# Altium footprint library WR-MJ.PcbLib: 84 footprints (part 5 of 6)
Each footprint in its own frame and in the unit in brackets; x right, y up, seen from the top. Pads: shape width x height; smd on the part's side, far side on the other; paste and mask are expansions set on the pad; w line width, h text height; cw(c..) or ccw(c..) is an arc to the next point about the centre after c.
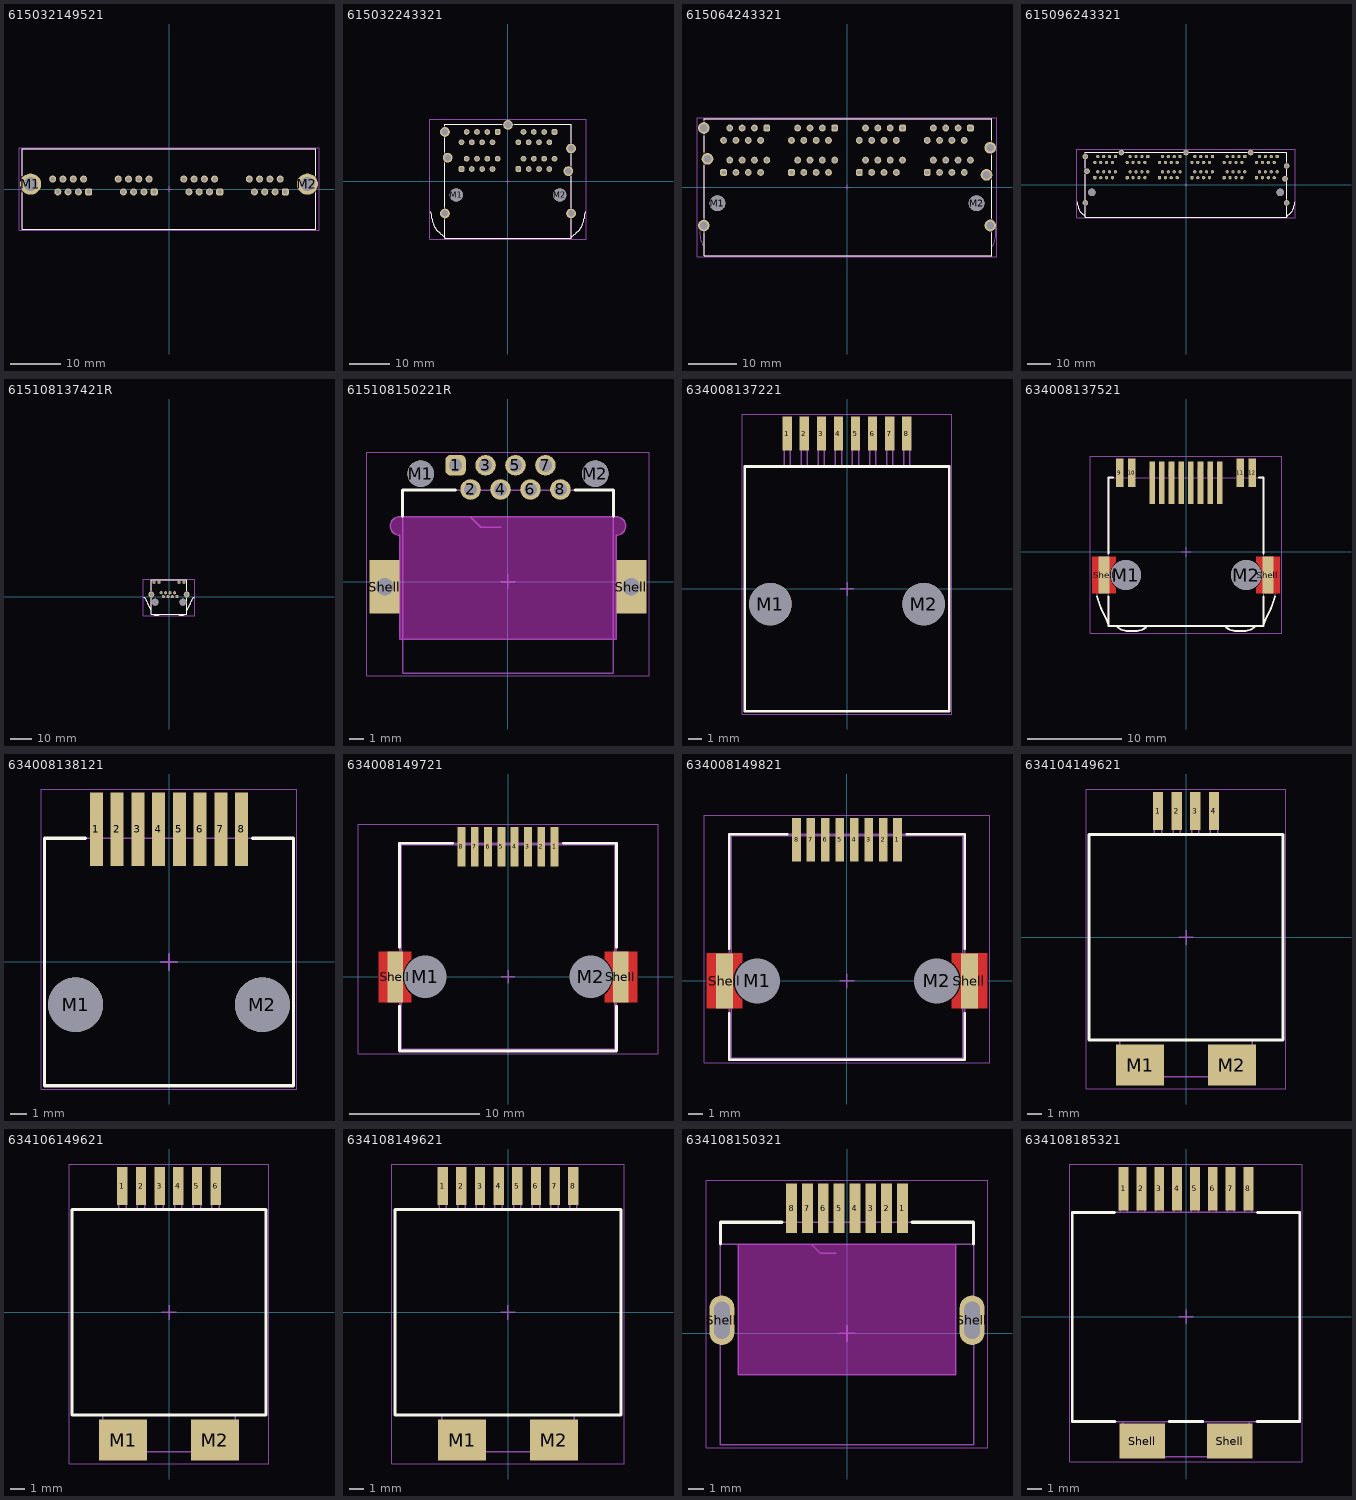
[diagram p4: the footprints below, top view; thin cyan lines are the x and y axes]

## 615032149521 [mm] "Modular Jack Horizontal Plastic 8P8C Assembly Tab Up"
height 15.4
pads (34):
  rrect50% 1.4x1.4 hole 0.9: A1(-15.93,-0.57) B1(-2.93,-0.57) C1(10.07,-0.57) D1(23.07,-0.57)
  round 1.4 hole 0.9: A2(-16.95,1.97) A3(-17.97,-0.57) A4(-18.99,1.97) A5(-20.01,-0.57) A6(-21.03,1.97) A7(-22.05,-0.57) A8(-23.07,1.97) B2(-3.95,1.97) B3(-4.97,-0.57) B4(-5.99,1.97) B5(-7.01,-0.57) B6(-8.03,1.97) B7(-9.05,-0.57) B8(-10.07,1.97) C2(9.05,1.97) C3(8.03,-0.57) C4(7.01,1.97) C5(5.99,-0.57) C6(4.97,1.97) C7(3.95,-0.57) C8(2.93,1.97) D2(22.05,1.97) D3(21.03,-0.57) D4(20.01,1.97) D5(18.99,-0.57) D6(17.97,1.97) D7(16.95,-0.57) D8(15.93,1.97)
  round 4.2 hole 2.8: M1(-27.45,0.97) M2(27.45,0.97)
Top Overlay:
  lines w0.2: -29.14,-0.75 -29.14,-8 29.14,-8 29.14,-0.75 ; -29.14,2.65 -29.14,8 29.14,8 29.14,2.65
Top Assembly:
  lines w0.1: -29.14,-8 -29.14,8 29.14,8 29.14,-8 -29.14,-8
Top Designator:
  text ".Designator" at -3.647,-0.357 h1
Top Courtyard:
  lines w0.05: -29.75,-8.2 29.75,-8.2 29.75,8.2 -29.75,8.2 -29.75,-8.2
Top Component Center:
  lines w0.1: -0.5,0 0.5,0 ; 0,-0.5 0,0.5
3D body "615032149521.stp": height 15.53, standoff -4.01, extent -29.14,-8 29.14,8

## 615032243321 [mm] "Modular Jack Horizontal Shielded 2x Dual Stacked with EMI Panel Finger 8P8C Tab Up&Down"
height 25.29
pads (41):
  rrect50% 1.4x1.4 hole 0.89: A1(-2.54,12.17) B1(11.43,12.17) C1(-11.43,3.05) D1(2.54,3.05)
  round 1.4 hole 0.89: A2(-3.81,9.63) A3(-5.08,12.17) A4(-6.35,9.63) A5(-7.62,12.17) A6(-8.89,9.63) A7(-10.16,12.17) A8(-11.43,9.63) B2(10.16,9.63) B3(8.89,12.17) B4(7.62,9.63) B5(6.35,12.17) B6(5.08,9.63) B7(3.81,12.17) B8(2.54,9.63) C2(-10.16,5.59) C3(-8.89,3.05) C4(-7.62,5.59) C5(-6.35,3.05) C6(-5.08,5.59) C7(-3.81,3.05) C8(-2.54,5.59) D2(3.81,5.59) D3(5.08,3.05) D4(6.35,5.59) D5(7.62,3.05) D6(8.89,5.59) D7(10.16,3.05) D8(11.43,5.59)
  round 3.25 hole 3.25 unplated: M1(-12.7,-3.3) M2(12.7,-3.3)
  round 2.4 hole 1.6: Shell(-15.495,-7.87) Shell(-15.495,12.17) Shell(-14.82,5.84) Shell(0,13.9) Shell(14.82,2.54) Shell(15.495,-7.87) Shell(15.495,8.1)
Top Overlay:
  lines w0.2: -18.991,-7.388 cw(c-27.747,-9.899) -18.677,-9.062 ccw(c-14.174,-8.889) -17.251,-12.18 ccw(c-13.756,-9.252) -16.336,-13.012 ccw(c-9.917,-7.318) -15.585,-13.76 ; -15.585,-9.35 -15.585,-14 15.585,-14 15.585,-9.34 ; -15.585,-6.39 -15.585,4.55 ; -15.585,7.13 -15.585,10.7 ; -15.585,13.64 -15.585,14 -1.485,14 ; 1.485,14 15.585,14 15.585,9.55 ; 15.585,-13.76 ccw(c9.917,-7.318) 16.336,-13.012 ccw(c13.756,-9.252) 17.252,-12.18 ccw(c14.175,-8.889) 18.677,-9.062 cw(c27.747,-9.899) 18.991,-7.388 ; 15.585,-6.4 15.585,1.28 ; 15.585,3.8 15.585,6.65
Top Assembly:
  lines w0.1: -18.991,-7.388 cw(c-27.747,-9.899) -18.677,-9.062 ccw(c-14.174,-8.889) -17.251,-12.18 ccw(c-13.756,-9.252) -16.336,-13.012 ccw(c-9.917,-7.318) -15.585,-13.76 ; 15.585,-13.76 ccw(c9.917,-7.318) 16.336,-13.012 ccw(c13.756,-9.252) 17.252,-12.18 ccw(c14.175,-8.889) 18.677,-9.062 cw(c27.747,-9.899) 18.991,-7.388 ; -15.585,-14 15.585,-14 15.585,14 -15.585,14 -15.585,-14
Top Designator:
  text ".Designator" at -3.647,-0.357 h1
Top Courtyard:
  lines w0.05: -19.285,-14.2 19.285,-14.2 19.285,15.3 -19.285,15.3 -19.285,-14.2
Top Component Center:
  lines w0.1: -0.5,0 0.5,0 ; 0,-0.5 0,0.5
3D body "615032243321 (rev1).stp": height 29.84, standoff -4.57, extent -19.085,-14 19.085,14

## 615064243321 [mm] "Modular Jack Horizontal Shielded 2x4 Stacked with EMI Panel Finger 8P8C Tab Up&Down"
height 25.3
pads (72):
  rrect50% 1.4x1.4 hole 0.9: A1(-16.51,12.14) B1(-2.54,12.14) C1(11.43,12.14) D1(25.4,12.14) E1(-25.4,3) F1(-11.43,3) G1(2.54,3) H1(16.51,3)
  round 1.4 hole 0.9: A2(-17.78,9.6) A3(-19.05,12.14) A4(-20.32,9.6) A5(-21.59,12.14) A6(-22.86,9.6) A7(-24.13,12.14) A8(-25.4,9.6) B2(-3.81,9.6) B3(-5.08,12.14) B4(-6.35,9.6) B5(-7.62,12.14) B6(-8.89,9.6) B7(-10.16,12.14) B8(-11.43,9.6) C2(10.16,9.6) C3(8.89,12.14) C4(7.62,9.6) C5(6.35,12.14) C6(5.08,9.6) C7(3.81,12.14) C8(2.54,9.6) D2(24.13,9.6) D3(22.86,12.14) D4(21.59,9.6) D5(20.32,12.14) D6(19.05,9.6) D7(17.78,12.14) D8(16.51,9.6) E2(-24.13,5.54) E3(-22.86,3) E4(-21.59,5.54) E5(-20.32,3) E6(-19.05,5.54) E7(-17.78,3) E8(-16.51,5.54) F2(-10.16,5.54) F3(-8.89,3) F4(-7.62,5.54) F5(-6.35,3) F6(-5.08,5.54) F7(-3.81,3) F8(-2.54,5.54) G2(3.81,5.54) G3(5.08,3) G4(6.35,5.54) G5(7.62,3) G6(8.89,5.54) G7(10.16,3) G8(11.43,5.54) H2(17.78,5.54) H3(19.05,3) H4(20.32,5.54) H5(21.59,3) H6(22.86,5.54) H7(24.13,3) H8(25.4,5.54)
  round 3.25 hole 3.25 unplated: M1(-26.67,-3.35) M2(26.67,-3.35)
  round 2.4 hole 1.6: Shell(-29.47,-7.92) Shell(-29.47,12.15) Shell(-28.71,5.8) Shell(28.71,2.5) Shell(29.47,-7.92) Shell(29.47,8.08)
Top Overlay:
  lines w0.2: -29.42,-9.45 -29.42,-14.1 29.78,-14.1 29.78,-9.45 ; -29.42,-6.4 -29.42,4.45 ; -29.42,7.15 -29.42,10.6 ; -29.42,13.7 -29.42,14.1 29.78,14.1 29.78,9.6 ; 29.78,-6.4 29.78,1.4 ; 29.78,3.6 29.78,6.55
Top Assembly:
  lines w0.1: -29.42,-12.45 cw(c-24.62,-9.45) -29.42,-6.45 ; 29.78,-12.45 ccw(c24.98,-9.45) 29.78,-6.45 ; -29.42,-14.1 -29.42,14.1 29.78,14.1 29.78,-14.1 -29.42,-14.1
Top Designator:
  text ".Designator" at -3.647,-0.357 h1
Top Courtyard:
  lines w0.05: -30.87,-14.3 30.87,-14.3 30.87,14.3 -30.87,14.3 -30.87,-14.3
Top Component Center:
  lines w0.1: -0.5,0 0.5,0 ; 0,-0.5 0,0.5
3D body "615064243321 (rev1).stp": height 26.85, standoff -3.25, extent -30.22,-14.1 30.576,14.1

## 615096243321 [mm] "Modular Jack Horizontal Shielded 2x6 Stacked with EMI Panel Finger 8P8C Tab Up&Down"
height 25.2
pads (107):
  rrect50% 1.4x1.4 hole 0.89: A1(-30.48,12.27) B1(-16.51,12.27) C1(-2.54,12.27) D1(11.43,12.27) E1(25.4,12.27) F1(39.37,12.27) G1(-39.37,3.15) H1(-25.4,3.15) I1(-11.43,3.15) J1(2.54,3.15) K1(16.51,3.15) L1(30.48,3.15)
  round 1.4 hole 0.89: A2(-31.75,9.73) A3(-33.02,12.27) A4(-34.29,9.73) A5(-35.56,12.27) A6(-36.83,9.73) A7(-38.1,12.27) A8(-39.37,9.73) B2(-17.78,9.73) B3(-19.05,12.27) B4(-20.32,9.73) B5(-21.59,12.27) B6(-22.86,9.73) B7(-24.13,12.27) B8(-25.4,9.73) C2(-3.81,9.73) C3(-5.08,12.27) C4(-6.35,9.73) C5(-7.62,12.27) C6(-8.89,9.73) C7(-10.16,12.27) C8(-11.43,9.73) D2(10.16,9.73) D3(8.89,12.27) D4(7.62,9.73) D5(6.35,12.27) D6(5.08,9.73) D7(3.81,12.27) D8(2.54,9.73) E2(24.13,9.73) E3(22.86,12.27) E4(21.59,9.73) E5(20.32,12.27) E6(19.05,9.73) E7(17.78,12.27) E8(16.51,9.73) F2(38.1,9.73) F3(36.83,12.27) F4(35.56,9.73) F5(34.29,12.27) F6(33.02,9.73) F7(31.75,12.27) F8(30.48,9.73) G2(-38.1,5.69) G3(-36.83,3.15) G4(-35.56,5.69) G5(-34.29,3.15) G6(-33.02,5.69) G7(-31.75,3.15) G8(-30.48,5.69) H2(-24.13,5.69) H3(-22.86,3.15) H4(-21.59,5.69) H5(-20.32,3.15) H6(-19.05,5.69) H7(-17.78,3.15) H8(-16.51,5.69) I2(-10.16,5.69) I3(-8.89,3.15) I4(-7.62,5.69) I5(-6.35,3.15) I6(-5.08,5.69) I7(-3.81,3.15) I8(-2.54,5.69) J2(3.81,5.69) J3(5.08,3.15) J4(6.35,5.69) J5(7.62,3.15) J6(8.89,5.69) J7(10.16,3.15) J8(11.43,5.69) K2(17.78,5.69) K3(19.05,3.15) K4(20.32,5.69) K5(21.59,3.15) K6(22.86,5.69) K7(24.13,3.15) K8(25.4,5.69) L2(31.75,5.69) L3(33.02,3.15) L4(34.29,5.69) L5(35.56,3.15) L6(36.83,5.69) L7(38.1,3.15) L8(39.37,5.69)
  round 3.25 hole 3.25 unplated: M1(-40.64,-3.2) M2(40.64,-3.2)
  round 2.4 hole 1.6: Shell(-43.435,-7.77) Shell(-43.435,12.27) Shell(-42.76,5.94) Shell(-27.94,14) Shell(0,14) Shell(27.94,14) Shell(42.76,2.64) Shell(43.435,-7.77) Shell(43.435,8.2)
Top Overlay:
  lines w0.2: -46.926,-7.288 cw(c-55.682,-9.799) -46.612,-8.962 ccw(c-42.11,-8.789) -45.187,-12.08 ccw(c-41.691,-9.152) -44.271,-12.912 ccw(c-37.852,-7.218) -43.52,-13.66 ; -43.52,-9.25 -43.52,-13.9 43.52,-13.9 43.52,-9.29 ; -43.52,-6.29 -43.52,4.65 ; -43.52,7.23 -43.52,10.8 ; -43.52,13.74 -43.52,14.1 -29.42,14.1 ; -26.46,14.1 -1.47,14.1 ; 1.47,14.1 26.46,14.1 ; 29.41,14.1 43.52,14.1 43.52,9.7 ; 43.52,-13.66 ccw(c37.852,-7.218) 44.271,-12.912 ccw(c41.691,-9.152) 45.187,-12.08 ccw(c42.11,-8.789) 46.612,-8.962 cw(c55.682,-9.799) 46.926,-7.288 ; 43.52,-6.25 43.52,1.38 ; 43.52,3.9 43.52,6.7
Top Assembly:
  lines w0.1: -46.926,-7.288 cw(c-55.682,-9.799) -46.612,-8.962 ccw(c-42.11,-8.789) -45.187,-12.08 ccw(c-41.691,-9.152) -44.271,-12.912 ccw(c-37.852,-7.218) -43.52,-13.66 ; 43.52,-13.66 ccw(c37.852,-7.218) 44.271,-12.912 ccw(c41.691,-9.152) 45.187,-12.08 ccw(c42.11,-8.789) 46.612,-8.962 cw(c55.682,-9.799) 46.926,-7.288 ; -43.52,-13.9 -43.52,14.1 43.52,14.1 43.52,-13.9 -43.52,-13.9
Top Designator:
  text ".Designator" at -3.647,-0.357 h1
Top Courtyard:
  lines w0.05: -47.22,-14.1 -47.22,15.4 47.22,15.4 47.22,-14.1 -47.22,-14.1
Top Component Center:
  lines w0.1: -0.5,0 0.5,0 ; 0,-0.5 0,0.5
3D body "615096243321 (rev1).stp": height 30.15, standoff -3.15, extent -47.02,-13.9 47.02,14.1

## 615108137421R [mm] "Modular Jack Horizonal Shielded  with LED and EMI Panel Finger 8P8C  THR Compatible Tab Up"
height 13.3
pads (16):
  rrect50% 1.4x1.4 hole 0.9: 1(3.57,0.09)
  round 1.4 hole 0.9: 2(2.55,1.87) 3(1.53,0.09) 4(0.51,1.87) 5(-0.51,0.09) 6(-1.53,1.87) 7(-2.55,0.09) 8(-3.57,1.87)
  round 1.5 hole 1: 9(6.86,6.68) 10(4.57,6.68) 11(-4.57,6.68) 12(-6.86,6.68)
  round 3.2 hole 3.2 unplated: M1(-6.35,-2.45) M2(6.35,-2.45)
  round 2.7 hole 1.8: Shell(-8.075,1.11) Shell(8.075,1.11)
Top Overlay:
  lines w0.2: -11.44,-0.33 cw(c-11.308,-0.68) -10.958,-0.548 ccw(c26.511,16.052) -9.841,-2.87 ccw(c27.537,13.934) -8.815,-4.988 ccw(c6,3.953) -8.355,-5.708 cw(c-9.434,-6.311) -8.206,-6.168 ; -8.2,-0.55 -8.2,-7.85 8.2,-7.85 8.2,-0.55 ; -8.2,2.8 -8.2,7.85 8.2,7.85 8.2,2.8 ; -7.331,-7.851 ccw(c-6.167,-6.753) -6.07,-8.35 -5.37,-8.35 ccw(c-5.273,-6.753) -4.109,-7.851 ; 4.099,-7.851 ccw(c5.263,-6.753) 5.36,-8.35 6.06,-8.35 ccw(c6.157,-6.753) 7.321,-7.851 ; 8.206,-6.168 cw(c9.434,-6.311) 8.355,-5.708 ccw(c-6,3.953) 8.815,-4.988 ccw(c-27.537,13.934) 9.841,-2.87 ccw(c-26.511,16.052) 10.958,-0.548 cw(c11.308,-0.68) 11.44,-0.33
Top Assembly:
  lines w0.1: -11.44,-0.33 cw(c-11.308,-0.68) -10.958,-0.548 ccw(c26.511,16.052) -9.841,-2.87 ccw(c27.537,13.934) -8.815,-4.988 ccw(c6,3.953) -8.355,-5.708 cw(c-9.434,-6.311) -8.206,-6.168 ; -7.331,-7.851 ccw(c-6.167,-6.753) -6.07,-8.35 -5.37,-8.35 ccw(c-5.273,-6.753) -4.109,-7.851 ; 4.099,-7.851 ccw(c5.263,-6.753) 5.36,-8.35 6.06,-8.35 ccw(c6.157,-6.753) 7.321,-7.851 ; 8.206,-6.168 cw(c9.434,-6.311) 8.355,-5.708 ccw(c-6,3.953) 8.815,-4.988 ccw(c-27.537,13.934) 9.841,-2.87 ccw(c-26.511,16.052) 10.958,-0.548 cw(c11.308,-0.68) 11.44,-0.33 ; -8.2,-7.85 8.2,-7.85 8.2,7.85 -8.2,7.85 -8.2,-7.85
Top Designator:
  text ".Designator" at -3.647,-0.357 h1
Top Courtyard:
  lines w0.05: -11.72,-8.55 -11.72,8.05 11.72,8.05 11.72,-8.55 -11.72,-8.55
Top Component Center:
  lines w0.1: -0.5,0 0.5,0 ; 0,-0.5 0,0.5
3D body "615108137421R (rev1).stp": height 16.84, standoff -2.32, extent -11.516,-8.35 11.516,7.85

## 615108150221R [mm] "ModularJack_8P8C_THR_Horizontal_Shielded_Tab Down_UltraLowProfile"
height 10.9
pads (12):
  rrect50% 1.4x1.4 hole 0.9: 1(-3.57,7.925)
  round 1.4 hole 0.9: 2(-2.55,6.275) 3(-1.53,7.925) 4(-0.51,6.275) 5(0.51,7.925) 6(1.53,6.275) 7(2.55,7.925) 8(3.57,6.275)
  round 1.8 hole 1.8 unplated: M1(-5.95,7.345) M2(5.95,7.345)
  rect 2.05x3.63 / inner round 1.8 / far side round 1.8 hole 1.2: Shell(-8.4,-0.355) Shell(8.4,-0.355)
Top Overlay:
  lines w0.2: -7.175,4.425 -7.175,6.225 -3.575,6.225 ; 4.575,6.225 7.175,6.225 7.175,4.425
Top Paste:
  region: 7.375,1.46 9.425,1.46 9.425,-2.17 7.375,-2.17
  region: -9.425,1.46 -7.375,1.46 -7.375,-2.17 -9.425,-2.17
Keep-Out Layer:
  board cut-out: -7.375,-3.935 7.375,-3.935 7.375,3.145 7.502,3.145 7.738,3.242 7.918,3.422 8.015,3.658 8.015,3.912 7.918,4.148 7.738,4.328 7.502,4.425 7.375,4.425 -7.375,4.425 -7.502,4.425 -7.738,4.328 -7.918,4.148 -8.015,3.912 -8.015,3.658 -7.918,3.422 -7.738,3.242 -7.502,3.145 -7.375,3.145
Assembly Notes:
  lines w0.1: -7.175,4.425 7.175,4.425 ; -2.55,4.4 -1.85,3.7 -0.45,3.7 ; -7.375,-3.935 7.375,-3.935 7.375,3.145 ccw(c7.375,3.785) 7.375,4.425 -7.375,4.425 ccw(c-7.375,3.785) -7.375,3.145 -7.375,-3.935
  text "PCB End" at -0.226,3.5 h0.5
  text "PCB Cutout" at -4.4,-0.615 h1.22
Top Assembly:
  lines w0.1: -7.175,-6.225 -7.175,6.225 7.175,6.225 7.175,-6.225 -7.175,-6.225
Top Designator:
  text ".Designator" at -3.647,-0.357 h1
Top Courtyard:
  lines w0.05: -9.625,-6.425 -9.625,8.825 9.625,8.825 9.625,-6.425 -9.625,-6.425
Top Component Center:
  lines w0.1: -0.5,0 0.5,0 ; 0,-0.5 0,0.5
3D body "615108150221R.stp": height 7.4, standoff -3.25, extent -8.95,-6.225 8.95,8.168

## 634008137221 [mm] "Modular Jack SMT Horizontal Plastic 8P8C Tab Down"
height 12
pads (10):
  rect 0.7x2.54 smd: 1(-4.445,11.57) 2(-3.175,11.57) 3(-1.905,11.57) 4(-0.635,11.57) 5(0.635,11.57) 6(1.905,11.57) 7(3.175,11.57) 8(4.445,11.57)
  round 3.17 hole 3.17 unplated: M1(-5.715,-1.13) M2(5.715,-1.13)
Top Overlay:
  lines w0.2: -7.62,-9.13 -7.62,9.13 7.62,9.13 7.62,-9.13 -7.62,-9.13
Top Assembly:
  lines w0.1: -4.67,9.13 -4.67,11.93 -4.22,11.93 -4.22,9.13 ; -3.4,9.13 -3.4,11.93 -2.95,11.93 -2.95,9.13 ; -2.13,9.13 -2.13,11.93 -1.68,11.93 -1.68,9.13 ; -0.86,9.13 -0.86,11.93 -0.41,11.93 -0.41,9.13 ; 0.41,9.13 0.41,11.93 0.86,11.93 0.86,9.13 ; 1.68,9.13 1.68,11.93 2.13,11.93 2.13,9.13 ; 2.95,9.13 2.95,11.93 3.4,11.93 3.4,9.13 ; 4.22,9.13 4.22,11.93 4.67,11.93 4.67,9.13 ; -7.62,-9.13 7.62,-9.13 7.62,9.13 -7.62,9.13 -7.62,-9.13
Top Designator:
  text ".Designator" at -3.647,-0.357 h1
Top Courtyard:
  lines w0.05: -7.82,-9.33 -7.82,13.04 7.82,13.04 7.82,-9.33 -7.82,-9.33
Top Component Center:
  lines w0.1: -0.5,0 0.5,0 ; 0,-0.5 0,0.5
3D body "634008137221 (rev1).stp": height 12.95, standoff -3.41, extent -7.62,-9.13 7.62,11.928

## 634008137521 [mm] "Modular Jack Horizontal Shielded SMT with LED and EMI Panel Finger 8P8C Tab Up"
height 13.1
pads (16):
  rect 0.61x4.5 smd: 1(3.57,7.31) 2(2.55,7.31) 3(1.53,7.31) 4(0.51,7.31) 5(-0.51,7.31) 6(-1.53,7.31) 7(-2.55,7.31) 8(-3.57,7.31)
  rect 0.8x3.05 smd: 9(-6.98,8.35) 10(-5.71,8.35) 11(5.71,8.35) 12(6.98,8.35)
  round 3.2 hole 3.2 unplated: M1(-6.35,-2.45) M2(6.35,-2.45)
  rect 1.2x3.89 smd paste-403.566 mask-403.566: Shell(-8.66,-2.45) Shell(8.66,-2.45)
Top Layer:
  region: 9.905,-4.395 7.415,-4.395 7.415,-3.777 7.416,-3.777 7.557,-3.65 7.793,-3.352 7.957,-3.01 8.041,-2.639 8.041,-2.26 7.957,-1.889 7.793,-1.547 7.556,-1.249 7.415,-1.122 7.415,-0.505 9.905,-0.505
  region: -9.905,-4.395 -7.415,-4.395 -7.415,-3.777 -7.416,-3.777 -7.557,-3.65 -7.793,-3.352 -7.957,-3.01 -8.041,-2.639 -8.041,-2.26 -7.957,-1.889 -7.793,-1.547 -7.556,-1.249 -7.415,-1.122 -7.415,-0.505 -9.905,-0.505
Top Overlay:
  lines w0.2: -9.406,-4.685 ccw(c-0.032,-2.203) -8.492,-6.943 cw(c-11.947,-8.744) -8.2,-7.675 ; -8.2,-4.7 -8.2,-7.85 8.2,-7.85 8.2,-4.7 ; -8.2,-0.2 -8.2,7.85 -7.7,7.85 ; -7.331,-7.851 ccw(c-6.167,-6.753) -6.07,-8.35 -5.37,-8.35 ccw(c-5.273,-6.753) -4.109,-7.851 ; 4.109,-7.851 ccw(c5.273,-6.753) 5.37,-8.35 6.07,-8.35 ccw(c6.167,-6.753) 7.331,-7.851 ; 7.7,7.85 8.2,7.85 8.2,-0.2 ; 8.2,-7.675 cw(c11.947,-8.744) 8.492,-6.943 ccw(c0.032,-2.203) 9.406,-4.685
Top Assembly:
  lines w0.1: -9.754,-1.207 ccw(c1.065,-1.649) -9.721,-2.609 ccw(c-0.032,-2.203) -8.492,-6.943 cw(c-11.947,-8.744) -8.2,-7.675 ; -7.331,-7.851 ccw(c-6.167,-6.753) -6.07,-8.35 -5.37,-8.35 ccw(c-5.273,-6.753) -4.109,-7.851 ; -7.205,7.85 -7.205,9.55 -6.755,9.55 -6.755,7.85 ; -5.935,7.85 -5.935,9.55 -5.485,9.55 -5.485,7.85 ; -3.795,7.85 -3.795,8.75 -3.345,8.75 -3.345,7.85 ; -2.775,7.85 -2.775,8.75 -2.325,8.75 -2.325,7.85 ; -1.755,7.85 -1.755,8.75 -1.305,8.75 -1.305,7.85 ; -0.735,7.85 -0.735,8.75 -0.285,8.75 -0.285,7.85 ; 0.285,7.85 0.285,8.75 0.735,8.75 0.735,7.85 ; 1.305,7.85 1.305,8.75 1.755,8.75 1.755,7.85 ; 2.325,7.85 2.325,8.75 2.775,8.75 2.775,7.85 ; 3.345,7.85 3.345,8.75 3.795,8.75 3.795,7.85 ; 4.109,-7.851 ccw(c5.273,-6.753) 5.37,-8.35 6.07,-8.35 ccw(c6.167,-6.753) 7.331,-7.851 ; 5.485,7.85 5.485,9.55 5.935,9.55 5.935,7.85 ; 6.755,7.85 6.755,9.55 7.205,9.55 7.205,7.85 ; 8.2,-7.675 cw(c11.947,-8.744) 8.492,-6.943 ccw(c0.032,-2.203) 9.721,-2.609 ccw(c-1.065,-1.649) 9.754,-1.207 ; -8.2,-7.85 -8.2,7.85 8.2,7.85 8.2,-7.85 -8.2,-7.85
Top Designator:
  text ".Designator" at -3.647,-0.357 h1
Top Courtyard:
  lines w0.05: -10.11,-8.595 -10.11,10.075 10.11,10.075 10.11,-8.595 -10.11,-8.595
Top Component Center:
  lines w0.1: -0.5,0 0.5,0 ; 0,-0.5 0,0.5
3D body "634008137521.stp": height 15.02, standoff -1.38, extent -9.8,-8.45 9.8,9.55

## 634008138121 [mm] "Modular Jack SMT Vertical Plastic 8P8C"
height 15.24
pads (10):
  rect 0.8x4.5 smd: 1(-4.445,8.135) 2(-3.175,8.135) 3(-1.905,8.135) 4(-0.635,8.135) 5(0.635,8.135) 6(1.905,8.135) 7(3.175,8.135) 8(4.445,8.135)
  round 3.35 hole 3.35 unplated: M1(-5.715,-2.615) M2(5.715,-2.615)
Top Overlay:
  lines w0.2: -5.12,7.575 -7.62,7.575 -7.62,-7.575 7.62,-7.575 7.62,7.575 5.12,7.575
Top Assembly:
  lines w0.1: -4.645,7.575 -4.645,9.875 -4.245,9.875 -4.245,7.575 ; -3.375,7.575 -3.375,9.875 -2.975,9.875 -2.975,7.575 ; -2.105,7.575 -2.105,9.875 -1.705,9.875 -1.705,7.575 ; -0.835,7.575 -0.835,9.875 -0.435,9.875 -0.435,7.575 ; 0.435,7.575 0.435,9.875 0.835,9.875 0.835,7.575 ; 1.705,7.575 1.705,9.875 2.105,9.875 2.105,7.575 ; 2.975,7.575 2.975,9.875 3.375,9.875 3.375,7.575 ; 4.245,7.575 4.245,9.875 4.645,9.875 4.645,7.575 ; -7.62,-7.575 7.62,-7.575 7.62,7.575 -7.62,7.575 -7.62,-7.575
Top Designator:
  text ".Designator" at -3.647,-0.357 h1
Top Courtyard:
  lines w0.05: -7.82,-7.775 7.82,-7.775 7.82,10.585 -7.82,10.585 -7.82,-7.775
Top Component Center:
  lines w0.1: -0.5,0 0.5,0 ; 0,-0.5 0,0.5
3D body "634008138121.stp": height 13.05, standoff -2.65, extent -7.62,-7.575 7.62,9.875

## 634008149721 [mm] "Modular Jack Horizontal Shielded SMT with EMI Panel Finger 8P8C"
height 13.5
pads (12):
  rect 0.61x3.05 smd: 1(3.57,9.98) 2(2.55,9.98) 3(1.53,9.98) 4(0.51,9.98) 5(-0.51,9.98) 6(-1.53,9.98) 7(-2.55,9.98) 8(-3.57,9.98)
  round 3.15 hole 3.25 unplated: M1(-6.35,0) M2(6.35,0)
  rect 1.2x3.89 smd paste-403.566 mask-403.566: Shell(-8.66,0) Shell(8.66,0)
Top Layer:
  region: 9.91,-1.945 7.41,-1.945 7.41,-1.363 7.558,-1.234 7.805,-0.93 7.978,-0.578 8.066,-0.196 8.066,0.196 7.977,0.578 7.805,0.93 7.558,1.234 7.41,1.363 7.41,1.945 9.91,1.945
  region: -9.91,-1.945 -7.41,-1.945 -7.41,-1.363 -7.558,-1.234 -7.805,-0.93 -7.978,-0.578 -8.066,-0.196 -8.066,0.196 -7.977,0.578 -7.805,0.93 -7.558,1.234 -7.41,1.363 -7.41,1.945 -9.91,1.945
Top Overlay:
  lines w0.2: -8.325,-2.26 -8.325,-5.685 8.325,-5.685 8.325,-2.26 ; -8.325,2.29 -8.325,10.265 -4.225,10.265 ; 4.225,10.265 8.325,10.265 8.325,2.29
Top Assembly:
  lines w0.1: -8.325,-5.685 -8.325,10.265 8.325,10.265 8.325,-5.685 -8.325,-5.685
Top Designator:
  text ".Designator" at -3.647,-0.357 h1
Top 3D Body:
  lines w0.1: -8.2,-5.56 -8.2,10.14 8.2,10.14 8.2,-5.56 -8.2,-5.56
Top Courtyard:
  lines w0.05: -11.51,-5.885 11.51,-5.885 11.51,11.705 -11.51,11.705 -11.51,-5.885
Top Component Center:
  lines w0.1: -0.5,0 0.5,0 ; 0,-0.5 0,0.5
3D body "634008149721.stp": height 16.62, standoff -1.18, extent -11.31,-5.56 11.31,10.74

## 634008149821 [mm] "Modular Jack Horizontal Shielded SMT 8P8C Tab Up"
height 13.5
pads (12):
  rect 0.61x3.05 smd: 1(3.57,9.98) 2(2.55,9.98) 3(1.53,9.98) 4(0.51,9.98) 5(-0.51,9.98) 6(-1.53,9.98) 7(-2.55,9.98) 8(-3.57,9.98)
  round 3.1 hole 3.2 unplated: M1(-6.35,0) M2(6.35,0)
  rect 1.2x3.89 smd paste-403.566 mask-403.566: Shell(-8.66,0) Shell(8.66,0)
Top Layer:
  region: 9.91,-1.945 7.41,-1.945 7.41,-1.332 7.553,-1.204 7.791,-0.906 7.956,-0.563 8.041,-0.191 8.041,0.191 7.956,0.563 7.791,0.906 7.553,1.204 7.41,1.332 7.41,1.945 9.91,1.945
  region: -9.91,-1.945 -7.41,-1.945 -7.41,-1.332 -7.553,-1.204 -7.791,-0.906 -7.956,-0.563 -8.041,-0.191 -8.041,0.191 -7.956,0.563 -7.791,0.906 -7.553,1.204 -7.41,1.332 -7.41,1.945 -9.91,1.945
Top Overlay:
  lines w0.2: -8.325,-2.3 -8.325,-5.575 8.325,-5.575 8.325,-2.3 ; -8.325,2.3 -8.325,10.375 -4.225,10.375 ; 4.225,10.375 8.325,10.375 8.325,2.3
Top Assembly:
  lines w0.1: -8.325,-5.575 -8.325,10.375 8.325,10.375 8.325,-5.575 -8.325,-5.575
Top Designator:
  text ".Designator" at -3.647,-0.357 h1
Top 3D Body:
  lines w0.1: -8.2,-5.45 -8.2,10.25 8.2,10.25 8.2,-5.45 -8.2,-5.45
Top Courtyard:
  lines w0.05: -10.11,-5.775 -10.11,11.705 10.11,11.705 10.11,-5.775 -10.11,-5.775
Top Component Center:
  lines w0.1: -0.5,0 0.5,0 ; 0,-0.5 0,0.5
3D body "634008149821.stp": height 13.6, standoff -1.1, extent -9.4,-5.45 9.4,10.83

## 634104149621 [mm] "Modular Jack SMT Vertical Plastic 4P4C Top Entry"
height 12.9
pads (6):
  rect 0.7x2.6 smd: 1(-1.905,8.6) 2(-0.635,8.6) 3(0.635,8.6) 4(1.905,8.6)
  rect 3.25x2.8 smd: M1(-3.125,-8.7) M2(3.125,-8.7)
Top Overlay:
  lines w0.2: -6.6,-7 -6.6,7 6.6,7 6.6,-7 -6.6,-7
Top Assembly:
  lines w0.1: -4.5,-7 -4.5,-9.5 4.5,-9.5 4.5,-7 ; -2.155,7 -2.155,9 -1.655,9 -1.655,7 ; -0.885,7 -0.885,9 -0.385,9 -0.385,7 ; 0.385,7 0.385,9 0.885,9 0.885,7 ; 1.655,7 1.655,9 2.155,9 2.155,7 ; -6.6,-7 6.6,-7 6.6,7 -6.6,7 -6.6,-7
Top Designator:
  text ".Designator" at -3.647,-0.357 h1
Top Courtyard:
  lines w0.05: -6.8,-10.3 -6.8,10.1 6.8,10.1 6.8,-10.3 -6.8,-10.3
Top Component Center:
  lines w0.1: -0.5,0 0.5,0 ; 0,-0.5 0,0.5
3D body "634104149621.stp": height 13.04, standoff -0.03, extent -6.66,-9.505 6.66,9.004

## 634106149621 [mm] "Modular Jack SMT Vertical Plastic 6P6C Top Entry"
height 12.9
pads (8):
  rect 0.7x2.6 smd: 1(-3.175,8.6) 2(-1.905,8.6) 3(-0.635,8.6) 4(0.635,8.6) 5(1.905,8.6) 6(3.175,8.6)
  rect 3.25x2.8 smd: M1(-3.125,-8.7) M2(3.125,-8.7)
Top Overlay:
  lines w0.2: -6.6,-7 -6.6,7 6.6,7 6.6,-7 -6.6,-7
Top Assembly:
  lines w0.1: -4.5,-7 -4.5,-9.5 4.5,-9.5 4.5,-7 ; -3.425,7 -3.425,9 -2.925,9 -2.925,7 ; -2.155,7 -2.155,9 -1.655,9 -1.655,7 ; -0.885,7 -0.885,9 -0.385,9 -0.385,7 ; 0.385,7 0.385,9 0.885,9 0.885,7 ; 1.655,7 1.655,9 2.155,9 2.155,7 ; 2.925,7 2.925,9 3.425,9 3.425,7 ; -6.6,-7 6.6,-7 6.6,7 -6.6,7 -6.6,-7
Top Designator:
  text ".Designator" at -3.647,-0.357 h1
Top Courtyard:
  lines w0.05: -6.8,-10.3 6.8,-10.3 6.8,10.1 -6.8,10.1 -6.8,-10.3
Top Component Center:
  lines w0.1: -0.5,0 0.5,0 ; 0,-0.5 0,0.5
3D body "634106149621.stp": height 13.07, standoff 0, extent -6.66,-9.505 6.66,9.004

## 634108149621 [mm] "Modular Jack SMT Vertical Plastic 8P8C Top Entry"
height 13
pads (10):
  rect 0.7x2.6 smd: 1(-4.445,8.6) 2(-3.175,8.6) 3(-1.905,8.6) 4(-0.635,8.6) 5(0.635,8.6) 6(1.905,8.6) 7(3.175,8.6) 8(4.445,8.6)
  rect 3.25x2.8 smd: M1(-3.125,-8.7) M2(3.125,-8.7)
Top Overlay:
  lines w0.2: -7.7,-7 -7.7,7 7.7,7 7.7,-7 -7.7,-7
Top Assembly:
  lines w0.1: -4.695,7 -4.695,9 -4.195,9 -4.195,7 ; -4.5,-7 -4.5,-9.5 4.5,-9.5 4.5,-7 ; -3.425,7 -3.425,9 -2.925,9 -2.925,7 ; -2.155,7 -2.155,9 -1.655,9 -1.655,7 ; -0.885,7 -0.885,9 -0.385,9 -0.385,7 ; 0.385,7 0.385,9 0.885,9 0.885,7 ; 1.655,7 1.655,9 2.155,9 2.155,7 ; 2.925,7 2.925,9 3.425,9 3.425,7 ; 4.195,7 4.195,9 4.695,9 4.695,7 ; -7.7,-7 7.7,-7 7.7,7 -7.7,7 -7.7,-7
Top Designator:
  text ".Designator" at -3.647,-0.357 h1
Top Courtyard:
  lines w0.05: -7.9,-10.3 -7.9,10.1 7.9,10.1 7.9,-10.3 -7.9,-10.3
Top Component Center:
  lines w0.1: -0.5,0 0.5,0 ; 0,-0.5 0,0.5
3D body "634108149621.stp": height 13.09, standoff 0.02, extent -7.76,-9.5 7.76,9.009

## 634108150321 [mm] "Horizontal Mid-Mount Shielded_1x1 - SMT"
height 11.45
pads (10):
  rect 0.7x3.2 smd: 1(3.57,8.05) 2(2.55,8.05) 3(1.53,8.05) 4(0.51,8.05) 5(-0.51,8.05) 6(-1.53,8.05) 7(-2.55,8.05) 8(-3.57,8.05)
  oval 1.6x3.2 hole 1 slot 2.4 at 90 deg: Shell(-8.05,0.85) Shell(8.05,0.85)
Top Overlay:
  lines w0.2: -8.15,5.75 -8.15,7.15 -4.2,7.15 ; 4.2,7.15 8.15,7.15 8.15,5.75
Keep-Out Layer:
  board cut-out: -7,-2.65 7,-2.65 7,5.75 -7,5.75
Assembly Notes:
  lines w0.1: -8.15,5.75 8.15,5.75 ; -2.3,5.75 -1.7,5.15 -0.7,5.15 ; -7,-2.65 7,-2.65 7,5.75 -7,5.75 -7,-2.65
  text "PCB Cutout" at -3.4,0.9 h1.02
  text "PCB End" at -0.326,4.8 h0.5
Top Assembly:
  lines w0.1: -3.795,7.15 -3.795,8.95 -3.345,8.95 -3.345,7.15 ; -2.775,7.15 -2.775,8.95 -2.325,8.95 -2.325,7.15 ; -1.755,7.15 -1.755,8.95 -1.305,8.95 -1.305,7.15 ; -0.735,7.15 -0.735,8.95 -0.285,8.95 -0.285,7.15 ; 0.285,7.15 0.285,8.95 0.735,8.95 0.735,7.15 ; 1.305,7.15 1.305,8.95 1.755,8.95 1.755,7.15 ; 2.325,7.15 2.325,8.95 2.775,8.95 2.775,7.15 ; 3.345,7.15 3.345,8.95 3.795,8.95 3.795,7.15 ; -8.15,-7.15 8.15,-7.15 8.15,7.15 -8.15,7.15 -8.15,-7.15
Top Designator:
  text ".Designator" at -3.647,-0.357 h1
Top Courtyard:
  lines w0.05: -9.05,-7.35 -9.05,9.85 9.05,9.85 9.05,-7.35 -9.05,-7.35
Top Component Center:
  lines w0.1: -0.5,0 0.5,0 ; 0,-0.5 0,0.5
3D body "Download_STP_634108150321 (rev1).stp": height 8.77, standoff -2.53, extent -8.41,-7.15 8.41,8.95

## 634108185321 [mm] "Modular Jack Vertical Shielded SMT  with Solder Tab 8P8C Top Entry"
height 13.3
pads (10):
  rect 0.7x3.1 smd: 1(-4.445,9.15) 2(-3.175,9.15) 3(-1.905,9.15) 4(-0.635,9.15) 5(0.635,9.15) 6(1.905,9.15) 7(3.175,9.15) 8(4.445,9.15)
  rect 3.25x2.5 smd: Shell(-3.125,-8.85) Shell(3.125,-8.85)
Top Overlay:
  lines w0.2: -5.1,7.45 -8.1,7.45 -8.1,-7.45 -5.05,-7.45 ; -1.2,-7.45 1.2,-7.45 ; 5.05,-7.45 8.1,-7.45 8.1,7.45 5.1,7.45
Top Assembly:
  lines w0.1: -4.695,7.45 -4.695,9.1 -4.195,9.1 -4.195,7.45 ; -4.5,-7.45 -4.5,-9.95 4.5,-9.95 4.5,-7.45 ; -3.425,7.45 -3.425,9.1 -2.925,9.1 -2.925,7.45 ; -2.155,7.45 -2.155,9.1 -1.655,9.1 -1.655,7.45 ; -0.885,7.45 -0.885,9.1 -0.385,9.1 -0.385,7.45 ; 0.385,7.45 0.385,9.1 0.885,9.1 0.885,7.45 ; 1.655,7.45 1.655,9.1 2.155,9.1 2.155,7.45 ; 2.925,7.45 2.925,9.1 3.425,9.1 3.425,7.45 ; 4.195,7.45 4.195,9.1 4.695,9.1 4.695,7.45 ; -8.1,-7.45 8.1,-7.45 8.1,7.45 -8.1,7.45 -8.1,-7.45
Top Designator:
  text ".Designator" at -3.647,-0.357 h1
Top Courtyard:
  lines w0.05: -8.3,-10.3 8.3,-10.3 8.3,10.9 -8.3,10.9 -8.3,-10.3
Top Component Center:
  lines w0.1: -0.5,0 0.5,0 ; 0,-0.5 0,0.5
3D body "634108185321.stp": height 13.48, standoff 0.02, extent -8.16,-9.95 8.16,9.107